# Altium footprint library Miscellaneous Connectors.PcbLib: 245 footprints (part 9 of 16)
Each footprint in its own frame and in the unit in brackets; x right, y up, seen from the top. Pads: shape width x height; smd on the part's side, far side on the other; paste and mask are expansions set on the pad; w line width, h text height; cw(c..) or ccw(c..) is an arc to the next point about the centre after c.
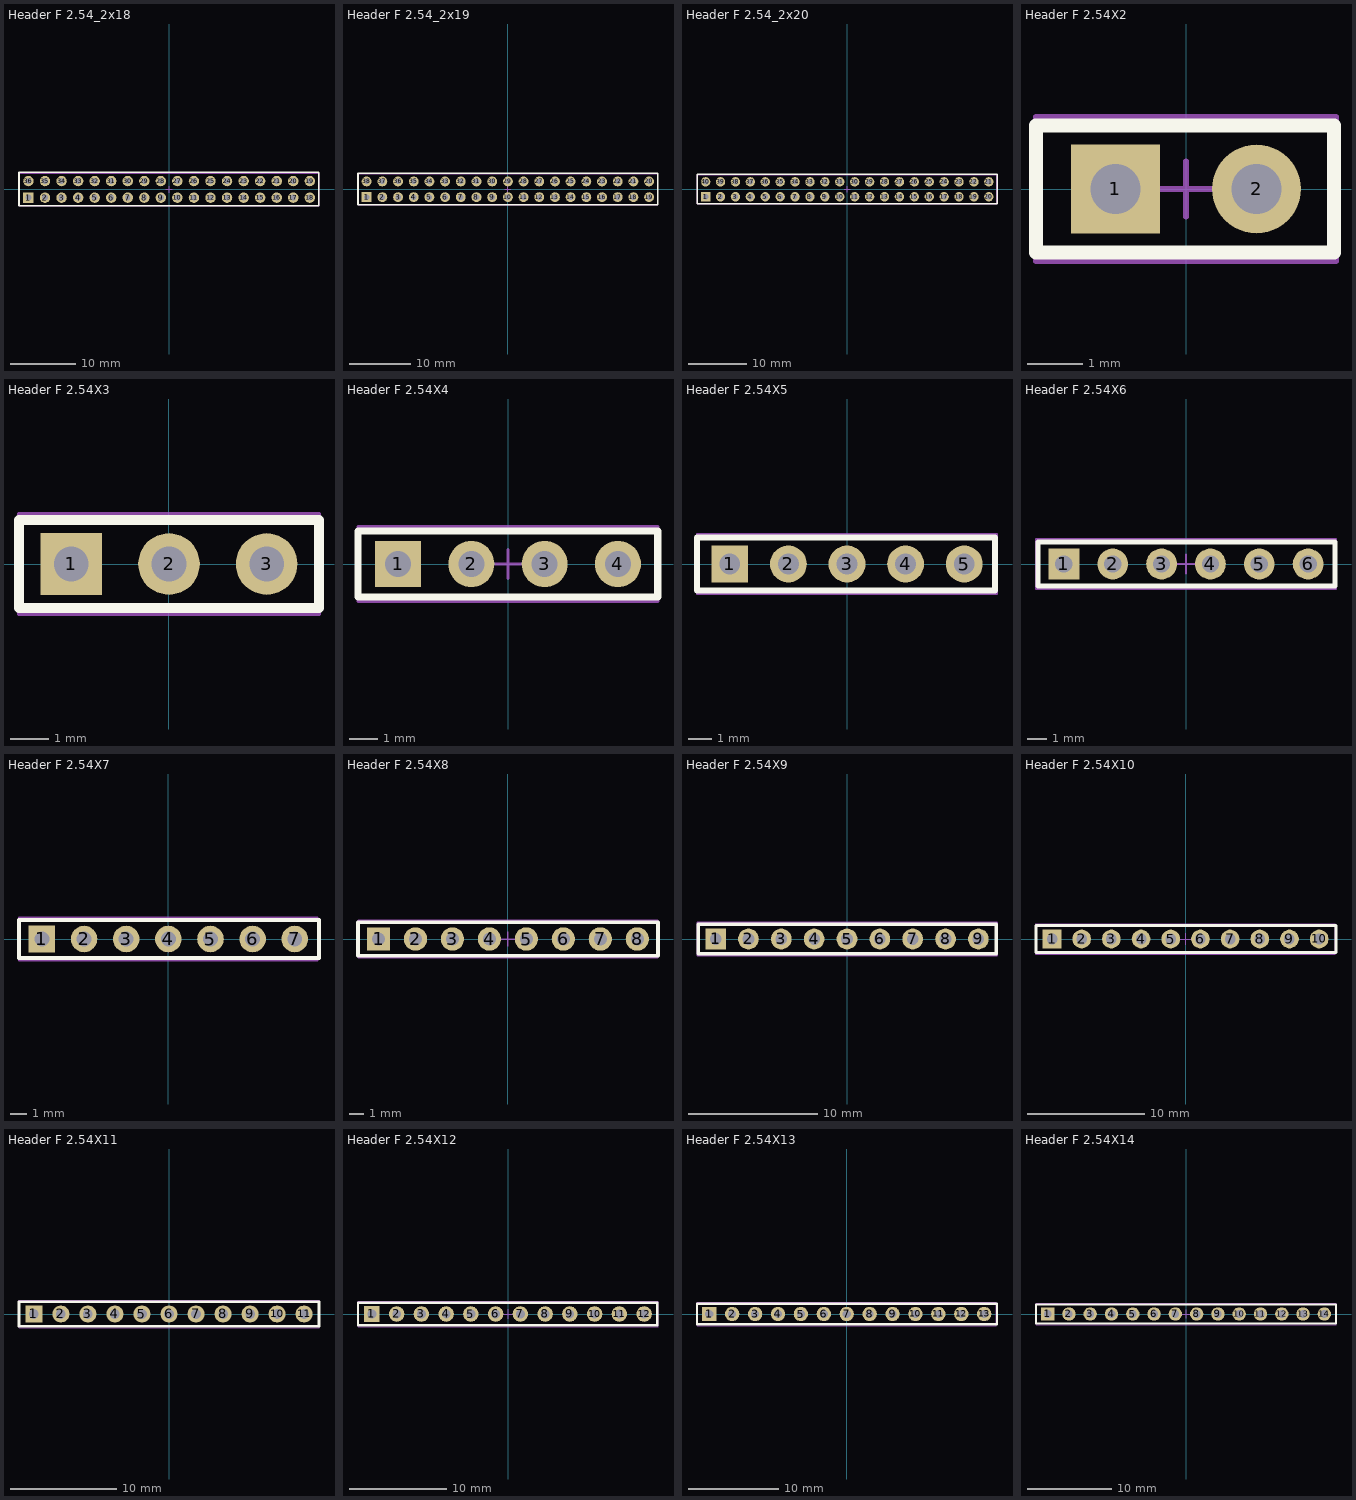
[diagram p8: the footprints below, top view; thin cyan lines are the x and y axes]

## Header F 2.54_2x18 [mm]
pads (36):
  rect 1.6x1.6 hole 0.9: 1(-21.59,-1.27)
  round 1.6 hole 0.9: 2(-19.05,-1.27) 3(-16.51,-1.27) 4(-13.97,-1.27) 5(-11.43,-1.27) 6(-8.89,-1.27) 7(-6.35,-1.27) 8(-3.81,-1.27) 9(-1.27,-1.27) 10(1.27,-1.27) 11(3.81,-1.27) 12(6.35,-1.27) 13(8.89,-1.27) 14(11.43,-1.27) 15(13.97,-1.27) 16(16.51,-1.27) 17(19.05,-1.27) 18(21.59,-1.27) 19(21.59,1.27) 20(19.05,1.27) 21(16.51,1.27) 22(13.97,1.27) 23(11.43,1.27) 24(8.89,1.27) 25(6.35,1.27) 26(3.81,1.27) 27(1.27,1.27) 28(-1.27,1.27) 29(-3.81,1.27) 30(-6.35,1.27) 31(-8.89,1.27) 32(-11.43,1.27) 33(-13.97,1.27) 34(-16.51,1.27) 35(-19.05,1.27) 36(-21.59,1.27)
Top Overlay:
  lines w0.254: -23.04,-2.5 -23.04,2.6 22.96,2.6 22.96,-2.5 -23.04,-2.5
Mechanical 15:
  lines w0.1: -0.5,0 0.5,0 ; 0,-0.5 0,0.5 ; -23,-2.5 -23,2.5 23,2.5 23,-2.5 -23,-2.5
3D body: height 8.6, standoff -3.1, extent -23.01,-2.5 22.96,2.5

## Header F 2.54_2x19 [mm]
pads (38):
  rect 1.6x1.6 hole 0.9: 1(-22.86,-1.27)
  round 1.6 hole 0.9: 2(-20.32,-1.27) 3(-17.78,-1.27) 4(-15.24,-1.27) 5(-12.7,-1.27) 6(-10.16,-1.27) 7(-7.62,-1.27) 8(-5.08,-1.27) 9(-2.54,-1.27) 10(0,-1.27) 11(2.54,-1.27) 12(5.08,-1.27) 13(7.62,-1.27) 14(10.16,-1.27) 15(12.7,-1.27) 16(15.24,-1.27) 17(17.78,-1.27) 18(20.32,-1.27) 19(22.86,-1.27) 20(22.86,1.27) 21(20.32,1.27) 22(17.78,1.27) 23(15.24,1.27) 24(12.7,1.27) 25(10.16,1.27) 26(7.62,1.27) 27(5.08,1.27) 28(2.54,1.27) 29(0,1.27) 30(-2.54,1.27) 31(-5.08,1.27) 32(-7.62,1.27) 33(-10.16,1.27) 34(-12.7,1.27) 35(-15.24,1.27) 36(-17.78,1.27) 37(-20.32,1.27) 38(-22.86,1.27)
Top Overlay:
  lines w0.254: -24.26,-2.5 24.29,-2.5 24.29,2.6 -24.26,2.6 -24.26,-2.5
Mechanical 15:
  lines w0.1: -0.5,0 0.5,0 ; 0,-0.5 0,0.5 ; -24.2,-2.5 24.3,-2.5 24.3,2.5 -24.2,2.5 -24.2,-2.5
3D body: height 8.6, standoff -3.1, extent -24.23,-2.5 24.28,2.5

## Header F 2.54_2x20 [mm]
pads (40):
  rect 1.6x1.6 hole 0.9: 1(-24.13,-1.27)
  round 1.6 hole 0.9: 2(-21.59,-1.27) 3(-19.05,-1.27) 4(-16.51,-1.27) 5(-13.97,-1.27) 6(-11.43,-1.27) 7(-8.89,-1.27) 8(-6.35,-1.27) 9(-3.81,-1.27) 10(-1.27,-1.27) 11(1.27,-1.27) 12(3.81,-1.27) 13(6.35,-1.27) 14(8.89,-1.27) 15(11.43,-1.27) 16(13.97,-1.27) 17(16.51,-1.27) 18(19.05,-1.27) 19(21.59,-1.27) 20(24.13,-1.27) 21(24.13,1.27) 22(21.59,1.27) 23(19.05,1.27) 24(16.51,1.27) 25(13.97,1.27) 26(11.43,1.27) 27(8.89,1.27) 28(6.35,1.27) 29(3.81,1.27) 30(1.27,1.27) 31(-1.27,1.27) 32(-3.81,1.27) 33(-6.35,1.27) 34(-8.89,1.27) 35(-11.43,1.27) 36(-13.97,1.27) 37(-16.51,1.27) 38(-19.05,1.27) 39(-21.59,1.27) 40(-24.13,1.27)
Top Overlay:
  lines w0.254: -25.58,-2.5 -25.58,2.6 25.52,2.6 25.52,-2.5 -25.58,-2.5
Mechanical 15:
  lines w0.1: -0.5,0 0.5,0 ; 0,-0.5 0,0.5 ; -25.6,-2.5 -25.6,2.5 25.5,2.5 25.5,-2.5 -25.6,-2.5
3D body: height 8.6, standoff -3.1, extent -25.55,-2.5 25.5,2.5

## Header F 2.54X2 [mm]
pads (2):
  rect 1.6x1.6 hole 0.9: 1(-1.27,0)
  round 1.6 hole 0.9: 2(1.27,0)
Top Overlay:
  lines w0.254: -2.7,-1.143 -2.7,1.143 2.667,1.143 2.667,-1.143 -2.7,-1.143
Mechanical 15:
  lines w0.1: -0.5,0 0.5,0 ; 0,-0.5 0,0.5 ; -2.7,-1.3 -2.7,1.3 2.7,1.3 2.7,-1.3 -2.7,-1.3
3D body: height 8.6, standoff -3.1, extent -2.665,-1.25 2.665,1.25

## Header F 2.54X3 [mm]
pads (3):
  rect 1.6x1.6 hole 0.9: 1(-2.54,0)
  round 1.6 hole 0.9: 2(0,0) 3(2.54,0)
Top Overlay:
  lines w0.254: -3.9,-1.143 -3.9,1.143 3.9,1.143 3.9,-1.143 -3.9,-1.143
Mechanical 15:
  lines w0.1: -3.9,-1.3 -3.9,1.3 3.9,1.3 3.9,-1.3 -3.9,-1.3
3D body: height 8.6, standoff -3.1, extent -3.935,-1.26 3.935,1.24

## Header F 2.54X4 [mm]
pads (4):
  rect 1.6x1.6 hole 0.9: 1(-3.81,0)
  round 1.6 hole 0.9: 2(-1.27,0) 3(1.27,0) 4(3.81,0)
Top Overlay:
  lines w0.254: -5.2,-1.143 5.19,-1.143 5.19,1.143 -5.2,1.143 -5.2,-1.143
Mechanical 15:
  lines w0.1: -0.5,0 0.5,0 ; 0,-0.5 0,0.5 ; -5.2,-1.3 5.2,-1.3 5.2,1.3 -5.2,1.3 -5.2,-1.3
3D body: height 8.6, standoff -3.1, extent -5.205,-1.25 5.205,1.25

## Header F 2.54X5 [mm]
pads (5):
  rect 1.6x1.6 hole 0.9: 1(-5.08,0)
  round 1.6 hole 0.9: 2(-2.54,0) 3(0,0) 4(2.54,0) 5(5.08,0)
Top Overlay:
  lines w0.254: -6.5,-1.143 -6.5,1.143 6.42,1.143 6.42,-1.143 -6.5,-1.143
Mechanical 15:
  lines w0.1: -6.5,-1.3 -6.5,1.3 6.5,1.3 6.5,-1.3 -6.5,-1.3
3D body: height 8.6, standoff -3.1, extent -6.475,-1.25 6.475,1.25

## Header F 2.54X6 [mm]
pads (6):
  rect 1.6x1.6 hole 0.9: 1(-6.35,0)
  round 1.6 hole 0.9: 2(-3.81,0) 3(-1.27,0) 4(1.27,0) 5(3.81,0) 6(6.35,0)
Top Overlay:
  lines w0.254: -7.7,-1.143 7.75,-1.143 7.75,1.143 -7.7,1.143 -7.7,-1.143
Mechanical 15:
  lines w0.1: -0.5,0 0.5,0 ; 0,-0.5 0,0.5 ; -7.8,-1.3 7.8,-1.3 7.8,1.3 -7.8,1.3 -7.8,-1.3
3D body: height 8.6, standoff -3.1, extent -7.745,-1.25 7.745,1.25

## Header F 2.54X7 [mm]
pads (7):
  rect 1.6x1.6 hole 0.9: 1(-7.62,0)
  round 1.6 hole 0.9: 2(-5.08,0) 3(-2.54,0) 4(0,0) 5(2.54,0) 6(5.08,0) 7(7.62,0)
Top Overlay:
  lines w0.254: -9,-1.143 9.08,-1.143 9.08,1.143 -9,1.143 -9,-1.143
Mechanical 15:
  lines w0.1: -9,-1.3 9,-1.3 9,1.3 -9,1.3 -9,-1.3
3D body: height 8.6, standoff -3.1, extent -9.015,-1.26 9.015,1.24

## Header F 2.54X8 [mm]
pads (8):
  rect 1.6x1.6 hole 0.9: 1(-8.89,0)
  round 1.6 hole 0.9: 2(-6.35,0) 3(-3.81,0) 4(-1.27,0) 5(1.27,0) 6(3.81,0) 7(6.35,0) 8(8.89,0)
Top Overlay:
  lines w0.254: -10.3,-1.143 10.31,-1.143 10.31,1.143 -10.3,1.143 -10.3,-1.143
Mechanical 15:
  lines w0.1: -0.5,0 0.5,0 ; 0,-0.5 0,0.5 ; -10.3,-1.3 10.3,-1.3 10.3,1.3 -10.3,1.3 -10.3,-1.3
3D body: height 8.6, standoff -3.1, extent -10.285,-1.26 10.285,1.24

## Header F 2.54X9 [mm]
pads (9):
  rect 1.6x1.6 hole 0.9: 1(-10.16,0)
  round 1.6 hole 0.9: 2(-7.62,0) 3(-5.08,0) 4(-2.54,0) 5(0,0) 6(2.54,0) 7(5.08,0) 8(7.62,0) 9(10.16,0)
Top Overlay:
  lines w0.254: -11.5,-1.143 11.54,-1.143 11.54,1.143 -11.5,1.143 -11.5,-1.143
Mechanical 15:
  lines w0.1: -11.6,-1.3 11.6,-1.3 11.6,1.3 -11.6,1.3 -11.6,-1.3
3D body: height 8.6, standoff -3.1, extent -11.555,-1.26 11.555,1.24

## Header F 2.54X10 [mm]
pads (10):
  rect 1.6x1.6 hole 0.9: 1(-11.43,0)
  round 1.6 hole 0.9: 2(-8.89,0) 3(-6.35,0) 4(-3.81,0) 5(-1.27,0) 6(1.27,0) 7(3.81,0) 8(6.35,0) 9(8.89,0) 10(11.43,0)
Top Overlay:
  lines w0.254: -12.8,-1.143 12.87,-1.143 12.87,1.143 -12.8,1.143 -12.8,-1.143
Mechanical 15:
  lines w0.1: -0.5,0 0.5,0 ; 0,-0.5 0,0.5 ; -12.8,-1.3 12.8,-1.3 12.8,1.3 -12.8,1.3 -12.8,-1.3
3D body: height 8.6, standoff -3.1, extent -12.825,-1.25 12.825,1.25

## Header F 2.54X11 [mm]
pads (11):
  rect 1.6x1.6 hole 0.9: 1(-12.7,0)
  round 1.6 hole 0.9: 2(-10.16,0) 3(-7.62,0) 4(-5.08,0) 5(-2.54,0) 6(0,0) 7(2.54,0) 8(5.08,0) 9(7.62,0) 10(10.16,0) 11(12.7,0)
Top Overlay:
  lines w0.254: -14.1,-1.143 -14.1,1.143 14.1,1.143 14.1,-1.143 -14.1,-1.143
Mechanical 15:
  lines w0.1: -14.1,-1.3 -14.1,1.3 14.1,1.3 14.1,-1.3 -14.1,-1.3
3D body: height 8.6, standoff -3.1, extent -14.095,-1.25 14.095,1.25

## Header F 2.54X12 [mm]
pads (12):
  rect 1.6x1.6 hole 0.9: 1(-13.97,0)
  round 1.6 hole 0.9: 2(-11.43,0) 3(-8.89,0) 4(-6.35,0) 5(-3.81,0) 6(-1.27,0) 7(1.27,0) 8(3.81,0) 9(6.35,0) 10(8.89,0) 11(11.43,0) 12(13.97,0)
Top Overlay:
  lines w0.254: -15.4,-1.143 -15.4,1.143 15.33,1.143 15.33,-1.143 -15.4,-1.143
Mechanical 15:
  lines w0.1: -0.5,0 0.5,0 ; 0,-0.5 0,0.5 ; -15.4,-1.3 -15.4,1.3 15.4,1.3 15.4,-1.3 -15.4,-1.3
3D body: height 8.6, standoff -3.1, extent -15.365,-1.25 15.365,1.25

## Header F 2.54X13 [mm]
pads (13):
  rect 1.6x1.6 hole 0.9: 1(-15.24,0)
  round 1.6 hole 0.9: 2(-12.7,0) 3(-10.16,0) 4(-7.62,0) 5(-5.08,0) 6(-2.54,0) 7(0,0) 8(2.54,0) 9(5.08,0) 10(7.62,0) 11(10.16,0) 12(12.7,0) 13(15.24,0)
Top Overlay:
  lines w0.254: -16.6,-1.143 16.66,-1.143 16.66,1.143 -16.6,1.143 -16.6,-1.143
Mechanical 15:
  lines w0.1: -16.6,-1.3 16.6,-1.3 16.6,1.3 -16.6,1.3 -16.6,-1.3
3D body: height 8.6, standoff -3.1, extent -16.635,-1.25 16.635,1.25

## Header F 2.54X14 [mm]
pads (14):
  rect 1.6x1.6 hole 0.9: 1(-16.51,0)
  round 1.6 hole 0.9: 2(-13.97,0) 3(-11.43,0) 4(-8.89,0) 5(-6.35,0) 6(-3.81,0) 7(-1.27,0) 8(1.27,0) 9(3.81,0) 10(6.35,0) 11(8.89,0) 12(11.43,0) 13(13.97,0) 14(16.51,0)
Top Overlay:
  lines w0.254: -17.9,-1.143 17.89,-1.143 17.89,1.143 -17.9,1.143 -17.9,-1.143
Mechanical 15:
  lines w0.1: -0.5,0 0.5,0 ; 0,-0.5 0,0.5 ; -17.9,-1.3 17.9,-1.3 17.9,1.3 -17.9,1.3 -17.9,-1.3
3D body: height 8.6, standoff -3.1, extent -17.905,-1.25 17.905,1.25